# Altium footprint library B3BEHALFSN.PcbLib: 1 footprints
Each footprint in its own frame and in the unit in brackets; x right, y up, seen from the top. Pads: shape width x height; smd on the part's side, far side on the other; paste and mask are expansions set on the pad; w line width, h text height; cw(c..) or ccw(c..) is an arc to the next point about the centre after c.
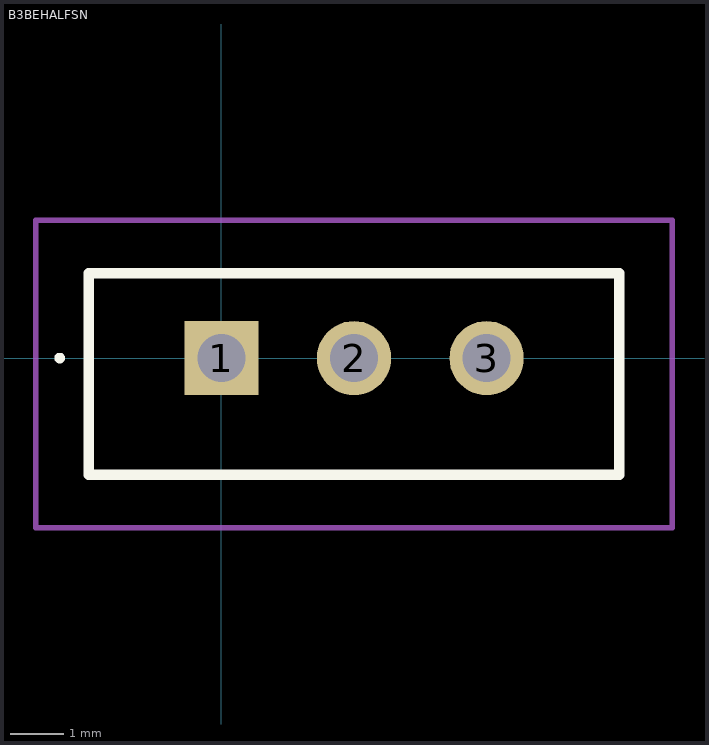
[diagram p0: the footprint, top view; thin cyan lines are the x and y axes]

## B3BEHALFSN [mm]
pads (3):
  rect 1.4x1.4 hole 0.9: 1(0,0)
  round 1.4 hole 0.9: 2(2.5,0) 3(5,0)
Top Overlay:
  lines w0.1: -3.1,0 cw(c-3.05,0) -3,0 cw(c-3.05,0) -3.1,0
  lines w0.2: -2.5,-2.2 -2.5,1.6 7.5,1.6 7.5,-2.2 -2.5,-2.2
Mechanical 15:
  lines w0.1: -2.5,-2.2 -2.5,1.6 7.5,1.6 7.5,-2.2 -2.5,-2.2
Mechanical 20:
  lines w0.1: -3.5,-3.2 -3.5,2.6 8.5,2.6 8.5,-3.2 -3.5,-3.2
3D body "B3B-EH-A__LF___SN_.stp": height 6.1, standoff -5, extent -2.46,-2.286 7.54,1.514